# Altium schematic symbol library TB67S249FTG_EL.SchLib: 1 symbol
Pins are listed as number, name and electrical type; pins without a type are passive.

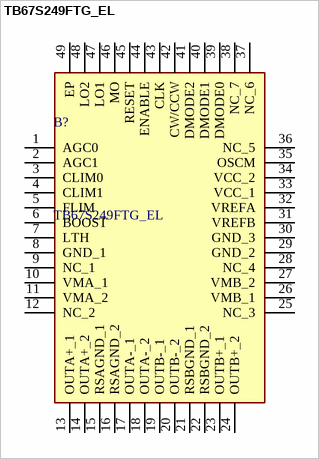
[diagram p0: symbol TB67S249FTG_EL]

## TB67S249FTG_EL
designator B?
Motor / Motion / Ignition Controllers & Drivers Stepping Motor Driver IC 50V 4.5A; Manufacturer_Name: Toshiba; Manufacturer_Part_Number: TB67S249FTG,EL; Geometry.Height: 1mm; Mouser Part Number: 757-TB67S249FTGEL; Mouser Price/Stock: https://www.mouser.co.uk/ProductDetail/Toshiba/TB67S249FTGEL?qs=1mbolxNpo8fmTK3GoCnwKw%3D%3D; Datasheet Link: http://toshiba.semicon-storage.com/info/docget.jsp?did=58560&prodName=TB67S249FTG
footprint QFN50P700X700X100-49N-D
pins: 1 AGC0, 2 AGC1, 3 CLIM0, 4 CLIM1, 5 FLIM, 6 BOOST, 7 LTH, 8 GND_1, 9 NC_1, 10 VMA_1, 11 VMA_2, 12 NC_2, 13 OUTA+_1, 14 OUTA+_2, 15 RSAGND_1, 16 RSAGND_2, 17 OUTA-_1, 18 OUTA-_2, 19 OUTB-_1, 20 OUTB-_2, 21 RSBGND_1, 22 RSBGND_2, 23 OUTB+_1, 24 OUTB+_2, 25 NC_3, 26 VMB_1, 27 VMB_2, 28 NC_4, 29 GND_2, 30 GND_3, 31 VREFB, 32 VREFA, 33 VCC_1, 34 VCC_2, 35 OSCM, 36 NC_5, 37 NC_6, 38 NC_7, 39 DMODE0, 40 DMODE1, 41 DMODE2, 42 CW/CCW, 43 CLK, 44 ENABLE, 45 RESET, 46 MO, 47 LO1, 48 LO2, 49 EP